# Altium footprint library LDCFullN.PcbLib: 36 footprints (part 3 of 3)
Each footprint in its own frame and in the unit in brackets; x right, y up, seen from the top. Pads: shape width x height; smd on the part's side, far side on the other; paste and mask are expansions set on the pad; w line width, h text height; cw(c..) or ccw(c..) is an arc to the next point about the centre after c.
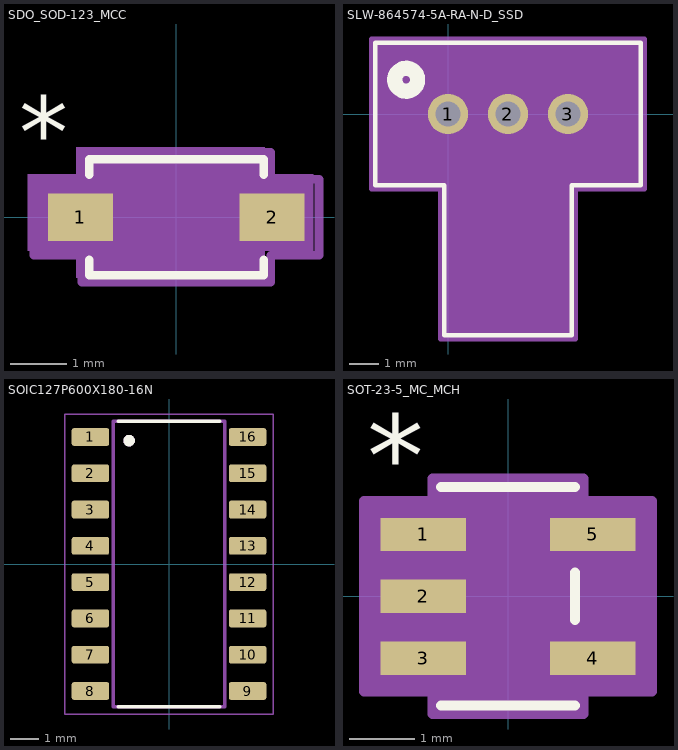
[diagram p2: the footprints below, top view; thin cyan lines are the x and y axes]

## SDO_SOD-123_MCC [mil]
pads (2):
  rect 45.56x33.36 smd paste+0 mask+0: 1(-67,0) 2(67,0)
Top Overlay:
  lines w6: -61,-29.78 -61,-40.5 61,-40.5 61,-29.78 ; -61,29.78 -61,40.5 61,40.5 61,29.78
  text "*" at -110,35 h50
Mechanical 13:
  lines w1: -76,-15.5 -76,15.5 -56,15.5 -56,-15.5 -76,-15.5 ; 56,-15.5 56,15.5 76,15.5 76,-15.5 56,-15.5
  text "*" at -110,35 h50
Mechanical 15:
  region: -70,-23.36 -103.78,-23.36 -103.78,30 -70,30 -70,48.82 62,48.82 62,30 95.78,30 95.78,-23.36 62,-23.36 62,-42.18 -70,-42.18
  lines w6: -99.78,-26.68 -99.78,26.68 -66,26.68 -66,45.5 66,45.5 66,26.68 99.78,26.68 99.78,-26.68 66,-26.68 66,-45.5 -66,-45.5 -66,-26.68 -99.78,-26.68
3D body "SDO_SOD-123_MCC.step": height 59.09, standoff 0, extent -75.98,-35.51 75.98,35.51

## SLW-864574-5A-RA-N-D_SSD [mil]
pads (3):
  round 53 / inner round 60 / far side round 53 hole 33 paste-99999 mask+0: 1(0,0) 2(78.74,0) 3(157.48,0)
Top Overlay:
  circle w20: c-55,45 r15
  lines w6: -95.76,-93.5 -95.76,93.5 253.24,93.5 253.24,-93.5 162.61,-93.5 162.61,-290.5 -5.13,-290.5 -5.13,-93.5 -95.76,-93.5
Bottom Overlay:
  circle w20: c-55,45 r15
Mechanical 13:
  circle w20: c0,75 r15
  lines w1: -0.13,-88.5 -0.13,-285.5 78.87,-285.5 78.87,-88.5 ; -90.76,-88.5 -90.76,88.5 248.24,88.5 248.24,-88.5 -90.76,-88.5
Mechanical 15:
  region: -100.76,98.5 -100.76,-98.5 -10.13,-98.5 -10.13,-295.5 167.61,-295.5 167.61,-98.5 258.24,-98.5 258.24,98.5
  lines w6: -100.76,-98.5 -10.13,-98.5 -10.13,-295.5 167.61,-295.5 167.61,-98.5 258.24,-98.5 258.24,98.5 -100.76,98.5 -100.76,-98.5

## SOIC127P600X180-16N [mm]
height 1.8
pads (16):
  rrect25% 1.31x0.62 smd: 1(-2.75,4.445) 2(-2.75,3.175) 3(-2.75,1.905) 4(-2.75,0.635) 5(-2.75,-0.635) 6(-2.75,-1.905) 7(-2.75,-3.175) 8(-2.75,-4.445) 9(2.75,-4.445) 10(2.75,-3.175) 11(2.75,-1.905) 12(2.75,-0.635) 13(2.75,0.635) 14(2.75,1.905) 15(2.75,3.175) 16(2.75,4.445)
Top Overlay:
  circle w0.2: c-1.397,4.318 r0.1
  lines w0.127: -1.775,-5 1.775,-5 -1.775,-5 ; -1.775,5 1.775,5 -1.775,5
Mechanical 13:
  circle w0.2: c-1.397,4.318 r0.1
  lines w0.127: -1.95,-5 1.95,-5 1.95,5 -1.95,5 -1.95,-5
Mechanical 15:
  lines w0.05: -3.655,-5.25 -3.655,5.25 3.655,5.25 3.655,-5.25 -3.655,-5.25
3D body "step_temp.STEP": height 1.8, standoff 0, extent -3,-5 3,5

## SOT-23-5_MC_MCH [mil]
pads (5):
  rect 51.56x20 smd paste+0 mask+0: 1(-51,37.4) 2(-51,0) 3(-51,-37.4) 4(51,-37.4) 5(51,37.4)
Top Overlay:
  lines w6: -40.5,-66 40.5,-66 ; -40.5,66 40.5,66 ; 40.5,-14.3 40.5,14.3
  text "*" at -85,60 h50
Mechanical 13:
  lines w1: -12,61 ccw(c0,61) 12,61 ; -63,-47.4 -63,-27.4 -35.5,-27.4 -35.5,-47.4 -63,-47.4 ; -63,-10 -63,10 -35.5,10 -35.5,-10 -63,-10 ; -63,27.4 -63,47.4 -35.5,47.4 -35.5,27.4 -63,27.4 ; -35.5,-61 35.5,-61 35.5,61 -35.5,61 -35.5,-61 ; 35.5,-47.4 35.5,-27.4 63,-27.4 63,-47.4 35.5,-47.4 ; 35.5,27.4 35.5,47.4 63,47.4 63,27.4 35.5,27.4
Mechanical 15:
  region: 45.5,-71 -45.5,-71 -45.5,-57.4 -86.78,-57.4 -86.78,57.4 -45.5,57.4 -45.5,71 45.5,71 45.5,57.4 86.78,57.4 86.78,-57.4 45.5,-57.4
  lines w6: -86.78,-57.4 -45.5,-57.4 -45.5,-71 45.5,-71 45.5,-57.4 86.78,-57.4 86.78,57.4 45.5,57.4 45.5,71 -45.5,71 -45.5,57.4 -86.78,57.4 -86.78,-57.4
3D body "SOT-23-5_MC_MCH.step": height 57.09, standoff 0, extent -62.99,-60.98 62.99,60.98